# Altium schematic symbol library RC0603FR-0715KL.SchLib: 1 symbol
Pins are listed as number, name and electrical type; pins without a type are passive.

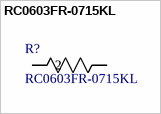
[diagram p0: symbol RC0603FR-0715KL]

## RC0603FR-0715KL
designator R?
RES SMD 15K OHM 1% 1/10W 0603; Manufacturer_Name: Yageo; Copyright: Copyright (C) 2026 Ultra Librarian. All rights reserved.; Manufacturer_Part_Number: RC0603FR-0715KL
footprint RC0603N_YAG
pins: 1, 2